# Altium footprint library Connector-PH.PcbLib: 69 footprints (part 4 of 5)
Each footprint in its own frame and in the unit in brackets; x right, y up, seen from the top. Pads: shape width x height; smd on the part's side, far side on the other; paste and mask are expansions set on the pad; w line width, h text height; cw(c..) or ccw(c..) is an arc to the next point about the centre after c.
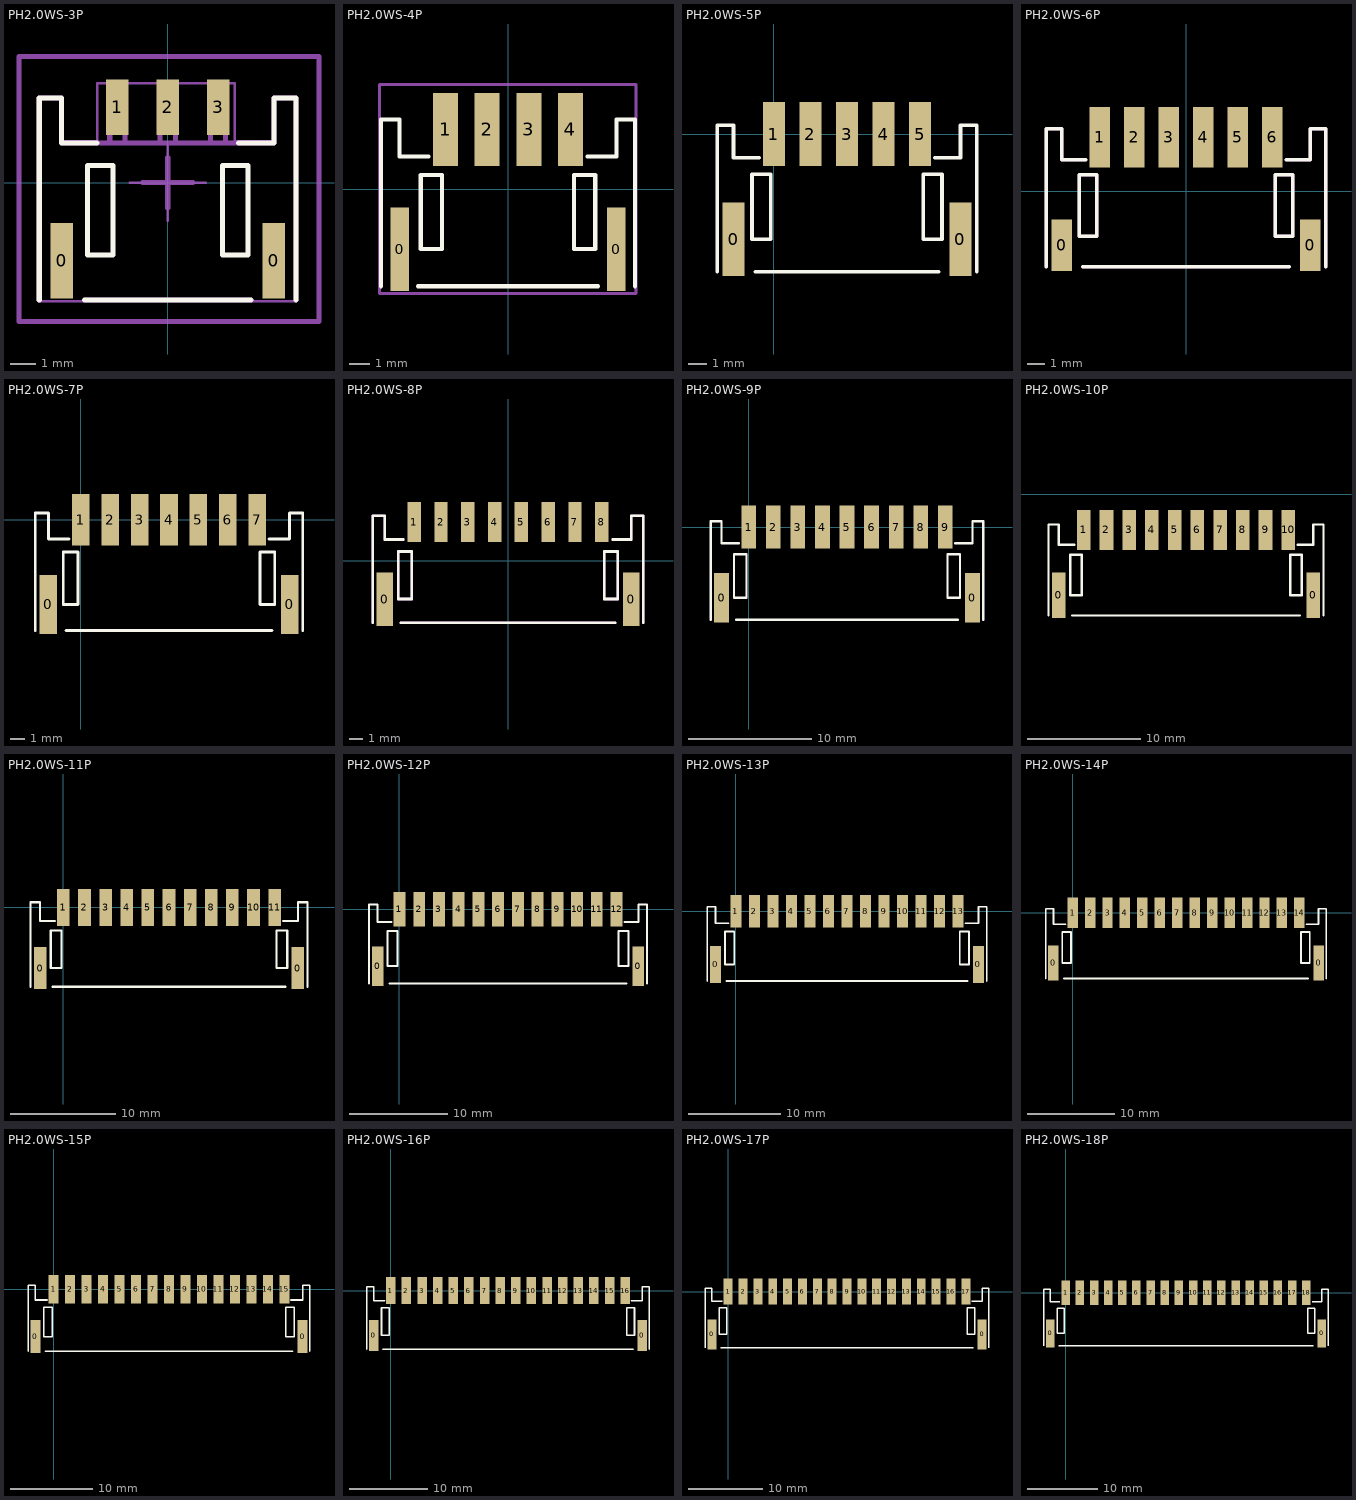
[diagram p3: the footprints below, top view; thin cyan lines are the x and y axes]

## PH2.0WS-3P [mm]
pads (5):
  rect 0.9x3 smd: 0(-4.2,-3.1) 0(4.2,-3.1)
  rect 0.9x2.2 smd: 1(-2,3) 2(0,3) 3(2,3)
Top Overlay:
  lines w0.2: -5.096,-4.647 -5.096,3.354 -4.207,3.354 -4.207,1.576 -2.81,1.576 ; -3.302,-4.647 3.302,-4.647 ; 2.81,1.576 4.207,1.576 4.207,3.354 5.096,3.354 5.096,-4.647 ; -3.191,-2.869 -3.191,0.687 -2.175,0.687 -2.175,-2.869 -3.191,-2.869 ; 2.175,-2.869 2.175,0.687 3.191,0.687 3.191,-2.869 2.175,-2.869
Top Component Outline:
  lines w0.1: -5.08,-4.699 5.08,-4.699 5.08,3.302 4.191,3.302 4.191,1.651 2.667,1.651 2.667,3.937 -2.794,3.937 -2.794,1.651 -4.191,1.651 -4.191,3.302 -5.08,3.302 -5.08,-4.699
Top Component Center:
  lines w0.1: -1.5,0 1.5,0 ; 0,-1.5 0,1.5
Top Value:
  text "'.Comment'" at -2.478,-0.342 h1.14
Top Designator:
  text "'.Designator'" at -4.377,-0.596 h1.52
Top Courtyard:
  lines w0.2: -1,0 1,0 ; 0,-1 0,1 ; -5.9,-5.5 6,-5.5 6,5 -5.9,5 -5.9,-5.5
Top Assembly (Mech20):
  lines w0.2: -5.096,-4.647 -5.096,3.354 -4.207,3.354 -4.207,1.576 -2.81,1.576 2.81,1.576 4.207,1.576 4.207,3.354 5.096,3.354 5.096,-4.647 ; -3.302,-4.647 3.302,-4.647 ; -2,1.576 -2.3,1.576 -2.3,3.7 -1.7,3.7 -1.7,1.576 ; -0.3,1.576 -0.3,3.7 0.3,3.7 0.3,1.576 ; 1.7,1.576 1.7,3.7 2.3,3.7 2.3,1.576
3D body "S3B-PH-SM4-TB.STEP": height 5.6, standoff 0, extent -4.95,-4.55 4.95,4.05

## PH2.0WS-4P [mm]
pads (6):
  rect 0.9x4 smd: 0(-5.2,-2.875) 0(5.2,-2.875)
  rect 1.2x3.5 smd: 1(-3,2.875) 2(-1,2.875) 3(1,2.875) 4(3,2.875)
Top Overlay:
  lines w0.2: -6.096,-4.647 -6.096,3.354 -5.207,3.354 -5.207,1.576 -3.81,1.576 ; -4.318,-4.647 4.318,-4.647 ; 3.81,1.576 5.207,1.576 5.207,3.354 6.096,3.354 6.096,-4.647 ; -4.191,-2.869 -4.191,0.687 -3.175,0.687 -3.175,-2.869 -4.191,-2.869 ; 3.175,-2.869 3.175,0.687 4.191,0.687 4.191,-2.869 3.175,-2.869
Top Value:
  text "'.Comment'" at -2.478,-0.367 h1.14
Top Designator:
  text "'.Designator'" at -4.377,-0.621 h1.52
Top Courtyard:
  lines w0.152: -6.175,-4.999 -6.175,5.034 6.144,5.034 6.144,-4.999 -6.175,-4.999
3D body "S4B-PH-SM4-TB.STEP": height 5.6, standoff 0, extent -5.902,-4.872 5.998,3.728

## PH2.0WS-5P [mm]
pads (7):
  rect 1.2x4 smd: 0(-2.2,-5.75) 0(10.2,-5.75)
  rect 1.2x3.5 smd: 1(0,0) 2(2,0) 3(4,0) 4(6,0) 5(8,0)
Top Overlay:
  lines w0.2: -3.096,-7.522 -3.096,0.479 -2.207,0.479 -2.207,-1.299 -0.81,-1.299 ; -1,-7.522 9,-7.522 ; 8.81,-1.299 10.207,-1.299 10.207,0.479 11.096,0.479 11.096,-7.522 ; -1.191,-5.744 -1.191,-2.188 -0.175,-2.188 -0.175,-5.744 -1.191,-5.744 ; 8.175,-5.744 8.175,-2.188 9.191,-2.188 9.191,-5.744 8.175,-5.744

## PH2.0WS-6P [mm]
pads (8):
  rect 1.2x3 smd: 0(-7.2,-3.134) 0(7.2,-3.134)
  rect 1.2x3.5 smd: 1(-5,3.134) 2(-3,3.134) 3(-1,3.134) 4(1,3.134) 5(3,3.134) 6(5,3.134)
Top Overlay:
  lines w0.2: -8.096,-4.389 -8.096,3.612 -7.207,3.612 -7.207,1.834 -5.81,1.834 ; -6,-4.389 6,-4.389 ; 5.81,1.834 7.207,1.834 7.207,3.612 8.096,3.612 8.096,-4.389 ; -6.191,-2.611 -6.191,0.945 -5.175,0.945 -5.175,-2.611 -6.191,-2.611 ; 5.175,-2.611 5.175,0.945 6.191,0.945 6.191,-2.611 5.175,-2.611
Top Value:
  text "'.Comment'" at -4.228,-1.415 h2
Top Designator:
  text "'.Designator'" at -5.635,-1.253 h2
Top Assembly (Mech20):
  lines w0.2: -8.096,-4.389 -8.096,3.612 -7.207,3.612 -7.207,1.834 -5.81,1.834 ; -6,-4.389 6,-4.389 ; 5.81,1.834 7.207,1.834 7.207,3.612 8.096,3.612 8.096,-4.389 ; -6.191,-2.611 -6.191,0.945 -5.175,0.945 -5.175,-2.611 -6.191,-2.611 ; 5.175,-2.611 5.175,0.945 6.191,0.945 6.191,-2.611 5.175,-2.611
3D body "S6B-PH-SM4-TB.STEP": height 5.5, standoff -0.1, extent -7.95,-4.607 7.95,3.993

## PH2.0WS-7P [mm]
pads (9):
  rect 1.2x4 smd: 0(-2.2,-5.75) 0(14.2,-5.75)
  rect 1.2x3.5 smd: 1(0,0) 2(2,0) 3(4,0) 4(6,0) 5(8,0) 6(10,0) 7(12,0)
Top Overlay:
  lines w0.2: -3.096,-7.522 -3.096,0.479 -2.207,0.479 -2.207,-1.299 -0.81,-1.299 ; -1,-7.522 13,-7.522 ; 12.81,-1.299 14.207,-1.299 14.207,0.479 15.096,0.479 15.096,-7.522 ; -1.191,-5.744 -1.191,-2.188 -0.175,-2.188 -0.175,-5.744 -1.191,-5.744 ; 12.175,-5.744 12.175,-2.188 13.191,-2.188 13.191,-5.744 12.175,-5.744

## PH2.0WS-8P [mm]
pads (10):
  rect 1.2x4 smd: 0(-9.2,-2.875) 0(9.2,-2.875)
  rect 1x3 smd: 1(-7,2.875) 2(-5,2.875) 3(-3,2.875) 4(-1,2.875) 5(1,2.875) 6(3,2.875) 7(5,2.875) 8(7,2.875)
Top Overlay:
  lines w0.2: -10.096,-4.647 -10.096,3.354 -9.207,3.354 -9.207,1.576 -7.81,1.576 ; -8,-4.647 8,-4.647 ; 7.81,1.576 9.207,1.576 9.207,3.354 10.096,3.354 10.096,-4.647 ; -8.191,-2.869 -8.191,0.687 -7.175,0.687 -7.175,-2.869 -8.191,-2.869 ; 7.175,-2.869 7.175,0.687 8.191,0.687 8.191,-2.869 7.175,-2.869
Top Value:
  text "'.Comment'" at -2.578,-0.892 h1.14
Top Designator:
  text "'.Designator'" at -4.477,-1.146 h1.52
Top Assembly (Mech20):
  lines w0.2: -10.096,-4.647 -10.096,3.354 -9.207,3.354 -9.207,1.576 -7.81,1.576 ; -8,-4.647 8,-4.647 ; 7.81,1.576 9.207,1.576 9.207,3.354 10.096,3.354 10.096,-4.647 ; -8.191,-2.869 -8.191,0.687 -7.175,0.687 -7.175,-2.869 -8.191,-2.869 ; 7.175,-2.869 7.175,0.687 8.191,0.687 8.191,-2.869 7.175,-2.869
3D body "PH2.0WS-8P.step": height 5.6, standoff 0, extent -9.85,-4.625 10.051,3.675

## PH2.0WS-9P [mm]
pads (11):
  rect 1.2x4 smd: 0(-2.2,-5.75) 0(18.2,-5.75)
  rect 1.2x3.5 smd: 1(0,0) 2(2,0) 3(4,0) 4(6,0) 5(8,0) 6(10,0) 7(12,0) 8(14,0) 9(16,0)
Top Overlay:
  lines w0.2: -3.096,-7.522 -3.096,0.479 -2.207,0.479 -2.207,-1.299 -0.81,-1.299 ; -1,-7.522 17,-7.522 ; 16.81,-1.299 18.207,-1.299 18.207,0.479 19.096,0.479 19.096,-7.522 ; -1.191,-5.744 -1.191,-2.188 -0.175,-2.188 -0.175,-5.744 -1.191,-5.744 ; 16.175,-5.744 16.175,-2.188 17.191,-2.188 17.191,-5.744 16.175,-5.744

## PH2.0WS-10P [mm]
pads (12):
  rect 1.2x4 smd: 0(4.929,-8.896) 0(27.329,-8.896)
  rect 1.2x3.5 smd: 1(7.129,-3.146) 2(9.129,-3.146) 3(11.129,-3.146) 4(13.129,-3.146) 5(15.129,-3.146) 6(17.129,-3.146) 7(19.129,-3.146) 8(21.129,-3.146) 9(23.129,-3.146) 10(25.129,-3.146)
Top Overlay:
  lines w0.2: 4.033,-10.668 4.033,-2.667 4.922,-2.667 4.922,-4.445 6.319,-4.445 ; 6.129,-10.668 26.129,-10.668 ; 25.939,-4.445 27.336,-4.445 27.336,-2.667 28.225,-2.667 28.225,-10.668 ; 5.938,-8.89 6.954,-8.89 6.954,-5.334 5.938,-5.334 5.938,-8.89 ; 25.304,-8.89 26.32,-8.89 26.32,-5.334 25.304,-5.334 25.304,-8.89

## PH2.0WS-11P [mm]
pads (13):
  rect 1.2x4 smd: 0(-2.2,-5.75) 0(22.2,-5.75)
  rect 1.2x3.5 smd: 1(0,0) 2(2,0) 3(4,0) 4(6,0) 5(8,0) 6(10,0) 7(12,0) 8(14,0) 9(16,0) 10(18,0) 11(20,0)
Top Overlay:
  lines w0.2: -3.096,-7.522 -3.096,0.479 -2.207,0.479 -2.207,-1.299 -0.81,-1.299 ; -1,-7.522 21,-7.522 ; 20.81,-1.299 22.207,-1.299 22.207,0.479 23.096,0.479 23.096,-7.522 ; -1.191,-5.744 -0.175,-5.744 -0.175,-2.188 -1.191,-2.188 -1.191,-5.744 ; 20.175,-5.744 21.191,-5.744 21.191,-2.188 20.175,-2.188 20.175,-5.744

## PH2.0WS-12P [mm]
pads (14):
  rect 1.2x4 smd: 0(-2.2,-5.75) 0(24.2,-5.75)
  rect 1.2x3.5 smd: 1(0,0) 2(2,0) 3(4,0) 4(6,0) 5(8,0) 6(10,0) 7(12,0) 8(14,0) 9(16,0) 10(18,0) 11(20,0) 12(22,0)
Top Overlay:
  lines w0.2: -3.096,-7.522 -3.096,0.479 -2.207,0.479 -2.207,-1.299 -0.81,-1.299 ; -1,-7.522 23,-7.522 ; 22.81,-1.299 24.207,-1.299 24.207,0.479 25.096,0.479 25.096,-7.522 ; -1.191,-5.744 -1.191,-2.188 -0.175,-2.188 -0.175,-5.744 -1.191,-5.744 ; 22.175,-5.744 22.175,-2.188 23.191,-2.188 23.191,-5.744 22.175,-5.744

## PH2.0WS-13P [mm]
pads (15):
  rect 1.2x4 smd: 0(-2.2,-5.75) 0(26.2,-5.75)
  rect 1.2x3.5 smd: 1(0,0) 2(2,0) 3(4,0) 4(6,0) 5(8,0) 6(10,0) 7(12,0) 8(14,0) 9(16,0) 10(18,0) 11(20,0) 12(22,0) 13(24,0)
Top Overlay:
  lines w0.2: -3.096,-7.522 -3.096,0.479 -2.207,0.479 -2.207,-1.299 -0.81,-1.299 ; -1,-7.522 25,-7.522 ; 24.81,-1.299 26.207,-1.299 26.207,0.479 27.096,0.479 27.096,-7.522 ; -1.191,-5.744 -0.175,-5.744 -0.175,-2.188 -1.191,-2.188 -1.191,-5.744 ; 24.175,-5.744 25.191,-5.744 25.191,-2.188 24.175,-2.188 24.175,-5.744

## PH2.0WS-14P [mm]
pads (16):
  rect 1.2x4 smd: 0(-2.2,-5.75) 0(28.2,-5.75)
  rect 1.2x3.5 smd: 1(0,0) 2(2,0) 3(4,0) 4(6,0) 5(8,0) 6(10,0) 7(12,0) 8(14,0) 9(16,0) 10(18,0) 11(20,0) 12(22,0) 13(24,0) 14(26,0)
Top Overlay:
  lines w0.2: -3.096,-7.522 -3.096,0.479 -2.207,0.479 -2.207,-1.299 -0.81,-1.299 ; -1,-7.522 27,-7.522 ; 26.81,-1.299 28.207,-1.299 28.207,0.479 29.096,0.479 29.096,-7.522 ; -1.191,-5.744 -1.191,-2.188 -0.175,-2.188 -0.175,-5.744 -1.191,-5.744 ; 26.175,-5.744 26.175,-2.188 27.191,-2.188 27.191,-5.744 26.175,-5.744

## PH2.0WS-15P [mm]
pads (17):
  rect 1.2x4 smd: 0(-2.2,-5.75) 0(30.2,-5.75)
  rect 1.2x3.5 smd: 1(0,0) 2(2,0) 3(4,0) 4(6,0) 5(8,0) 6(10,0) 7(12,0) 8(14,0) 9(16,0) 10(18,0) 11(20,0) 12(22,0) 13(24,0) 14(26,0) 15(28,0)
Top Overlay:
  lines w0.2: -3.096,-7.522 -3.096,0.479 -2.207,0.479 -2.207,-1.299 -0.81,-1.299 ; -1,-7.522 29,-7.522 ; 28.81,-1.299 30.207,-1.299 30.207,0.479 31.096,0.479 31.096,-7.522 ; -1.191,-5.744 -0.175,-5.744 -0.175,-2.188 -1.191,-2.188 -1.191,-5.744 ; 28.175,-5.744 29.191,-5.744 29.191,-2.188 28.175,-2.188 28.175,-5.744

## PH2.0WS-16P [mm]
pads (18):
  rect 1.2x4 smd: 0(-2.2,-5.75) 0(32.2,-5.75)
  rect 1.2x3.5 smd: 1(0,0) 2(2,0) 3(4,0) 4(6,0) 5(8,0) 6(10,0) 7(12,0) 8(14,0) 9(16,0) 10(18,0) 11(20,0) 12(22,0) 13(24,0) 14(26,0) 15(28,0) 16(30,0)
Top Overlay:
  lines w0.2: -3.096,-7.522 -3.096,0.479 -2.207,0.479 -2.207,-1.299 -0.81,-1.299 ; -1,-7.522 31,-7.522 ; 30.81,-1.299 32.207,-1.299 32.207,0.479 33.096,0.479 33.096,-7.522 ; -1.191,-5.744 -1.191,-2.188 -0.175,-2.188 -0.175,-5.744 -1.191,-5.744 ; 30.175,-5.744 30.175,-2.188 31.191,-2.188 31.191,-5.744 30.175,-5.744

## PH2.0WS-17P [mm]
pads (19):
  rect 1.2x4 smd: 0(-2.2,-5.75) 0(34.2,-5.75)
  rect 1.2x3.5 smd: 1(0,0) 2(2,0) 3(4,0) 4(6,0) 5(8,0) 6(10,0) 7(12,0) 8(14,0) 9(16,0) 10(18,0) 11(20,0) 12(22,0) 13(24,0) 14(26,0) 15(28,0) 16(30,0) 17(32,0)
Top Overlay:
  lines w0.2: -3.096,-7.522 -3.096,0.479 -2.207,0.479 -2.207,-1.299 -0.81,-1.299 ; -1,-7.522 33,-7.522 ; 32.81,-1.299 34.207,-1.299 34.207,0.479 35.096,0.479 35.096,-7.522 ; -1.191,-5.744 -0.175,-5.744 -0.175,-2.188 -1.191,-2.188 -1.191,-5.744 ; 32.175,-5.744 33.191,-5.744 33.191,-2.188 32.175,-2.188 32.175,-5.744
3D body "PH2.0-WS-17P.STEP": height 5.55, standoff 0.05, extent -2.923,-7.395 35.077,1.205

## PH2.0WS-18P [mm]
pads (20):
  rect 1.2x4 smd: 0(-2.2,-5.75) 0(36.2,-5.75)
  rect 1.2x3.5 smd: 1(0,0) 2(2,0) 3(4,0) 4(6,0) 5(8,0) 6(10,0) 7(12,0) 8(14,0) 9(16,0) 10(18,0) 11(20,0) 12(22,0) 13(24,0) 14(26,0) 15(28,0) 16(30,0) 17(32,0) 18(34,0)
Top Overlay:
  lines w0.2: -3.096,-7.522 -3.096,0.479 -2.207,0.479 -2.207,-1.299 -0.81,-1.299 ; -1,-7.522 35,-7.522 ; 34.81,-1.299 36.207,-1.299 36.207,0.479 37.096,0.479 37.096,-7.522 ; -1.191,-5.744 -1.191,-2.188 -0.175,-2.188 -0.175,-5.744 -1.191,-5.744 ; 34.175,-5.744 34.175,-2.188 35.191,-2.188 35.191,-5.744 34.175,-5.744